# Altium schematic symbol library MAJ library.SchLib: 44 symbols
Pins are listed as number, name and electrical type; pins without a type are passive.

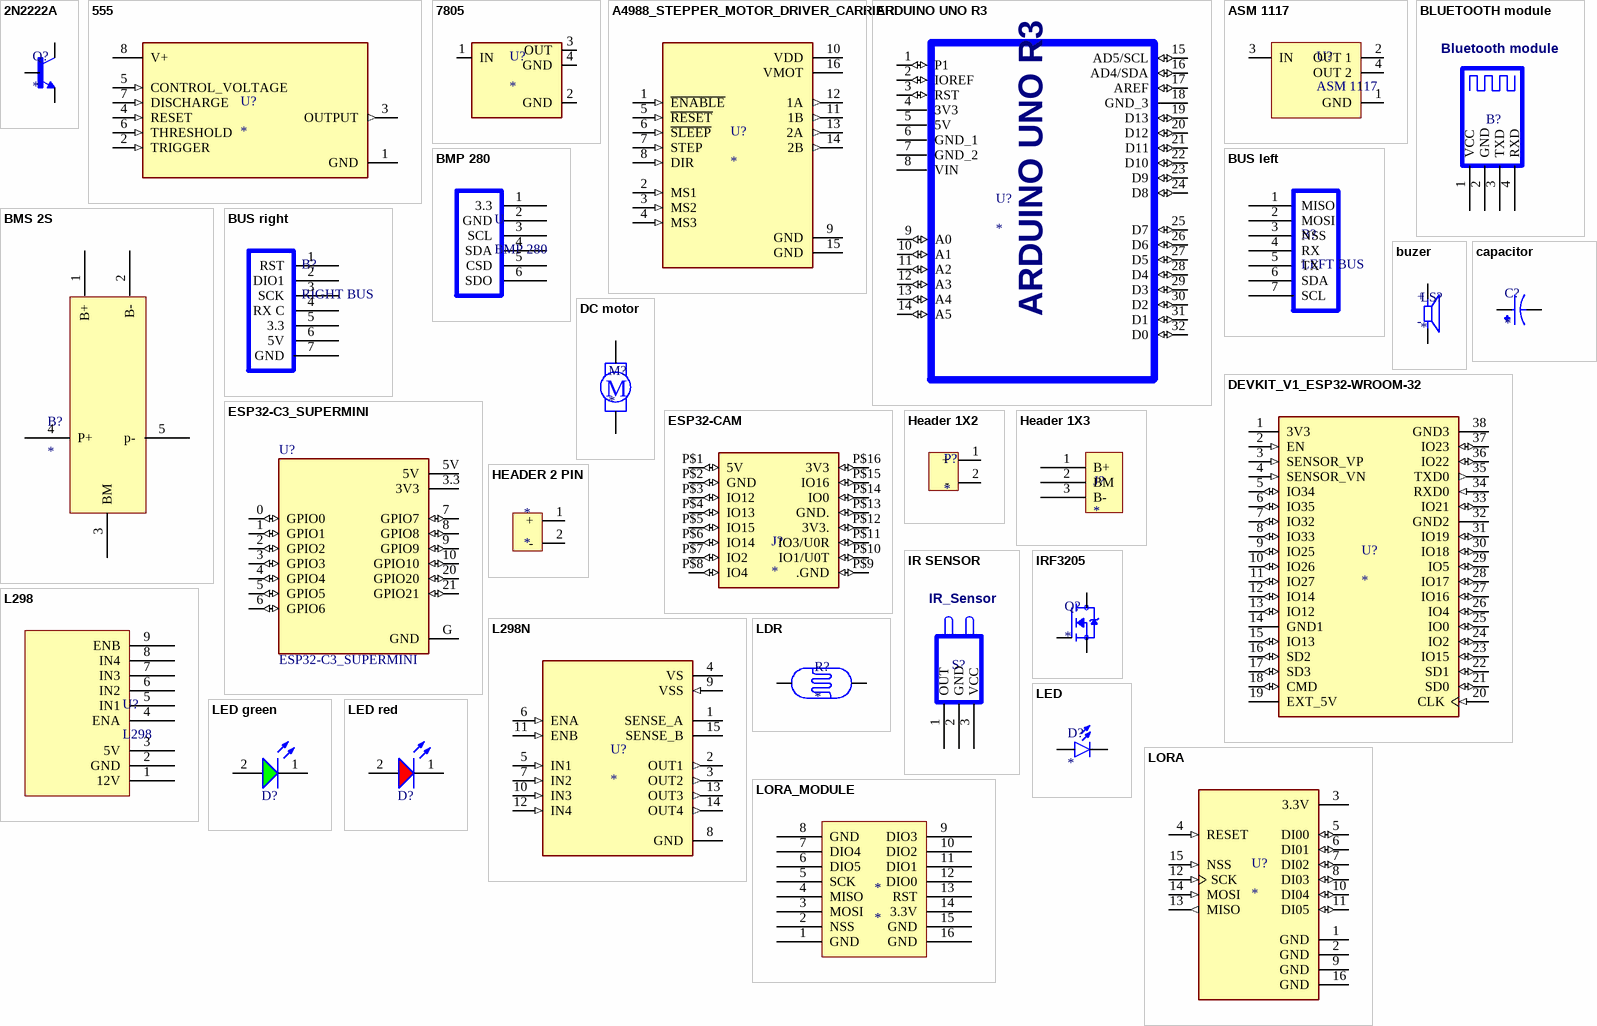
[diagram p0: symbols 2N2222A to LORA_MODULE]

## 2N2222A
designator Q?
Bipolar (BJT) Transistor NPN 40 V 600 mA 250MHz 625 mW Through Hole TO-92; MF: Diotec Semiconductor; MP: 2N2222A; Package: TO-92-3 Diotec; Check_prices: https://www.snapeda.com/parts/2N2222A/Diotec/view-part/?ref=eda; Value: *; Purchase-URL: https://pricing.snapeda.com/search/part/2N2222A/?ref=eda; Availability: In Stock; SnapEDA_Link: https://www.snapeda.com/parts/2N2222A/Diotec/view-part/?ref=snap; Price: None
footprint 2n2222
pins: 1 E, 2 B, 3 C

## 555
designator U?
Highly Stable 555 Timer; MP: LM555CM/NOPB; MF: Texas Instruments; Price: None; Availability: In Stock; Package: SOIC-8 Texas Instruments; Value: *; SnapEDA_Link: https://www.snapeda.com/parts/LM555CM/NOPB/Texas+Instruments/view-part/?ref=snap; Purchase-URL: https://pricing.snapeda.com/search/part/LM555CM/NOPB/?ref=eda; Check_prices: https://www.snapeda.com/parts/LM555CM/NOPB/Texas+Instruments/view-part/?ref=eda
footprint 555
pins: 1 GND (power), 2 TRIGGER (in), 3 OUTPUT (out), 4 RESET (in), 5 CONTROL_VOLTAGE (in), 6 THRESHOLD (in), 7 DISCHARGE (in), 8 V+ (power)

## 7805
designator U?
Linear Voltage Regulator IC 1 Output 1A SOT-223; MP: AZ1117EH-5.0TRG1; MF: Diodes Inc.; Package: SOT-223 Diodes Inc.; Digi-Key_Part_Number: AZ1117EH-5.0TRG1DICT-ND; SnapEDA_Link: https://www.snapeda.com/parts/AZ1117EH-5.0TRG1/Diodes%20Inc./view-part/795858/?ref=snap; Purchase-URL: https://pricing.snapeda.com/search/part/AZ1117EH-5.0TRG1/?ref=eda; Check_prices: https://www.snapeda.com/parts/AZ1117EH-5.0TRG1/Diodes%20Inc./view-part/795858/?ref=eda; Value: *
footprint 7805
pins: 1 IN (power), 2 GND (power), 3 OUT (power), 4 GND (power)

## A4988_STEPPER_MOTOR_DRIVER_CARRIER
designator U?
Stepper motor controler; IC: A4988; 1A; Uin mot: 8Ã·35V; MP: A4988_STEPPER_MOTOR_DRIVER_CARRIER; Price: None; Value: *; Package: None; Availability: Unavailable
footprint MODULE_A4988_STEPPER_MOTOR_DRIVER_CARRIER
pins: 1 ~{ENABLE} (in), 2 MS1 (in), 3 MS2 (in), 4 MS3 (in), 5 ~{RESET} (in), 6 ~{SLEEP} (in), 7 STEP (in), 8 DIR (in), 9 GND (power), 10 VDD (power), 11 1B (out), 12 1A (out), 13 2A (out), 14 2B (out), 15 GND (power), 16 VMOT (power)

## ARDUINO UNO R3
designator U?
footprint ARDUINO UNO
pins: 1 P1 (io), 2 IOREF (io), 3 RST (io), 4 3V3 (power), 5 5V (power), 6 GND_1 (power), 7 GND_2 (power), 8 VIN (power), 9 A0 (io), 10 A1 (io), 11 A2 (io), 12 A3 (io), 13 A4 (io), 14 A5 (io), 15 AD5/SCL (io), 16 AD4/SDA (io), 17 AREF (io), 18 GND_3 (power), 19 D13 (io), 20 D12 (io), 21 D11 (io), 22 D10 (io), 23 D9 (io), 24 D8 (io), 25 D7 (io), 26 D6 (io), 27 D5 (io), 28 D4 (io), 29 D3 (io), 30 D2 (io), 31 D1 (io), 32 D0 (io)

## ASM 1117
designator U?
footprint 7805
pins: 1  GND, 2  OUT 1, 3 IN, 4 OUT 2

## BLUETOOTH module
designator B?  (value not drawn)
footprint BLUETOOTH module
pins: 1 VCC, 2 GND, 3 TXD, 4 RXD
text: Bluetooth module

## BMP 280
designator U
footprint BMP 280
pins: 1 3.3, 2 GND, 3 SCL, 4 SDA, 5 CSD, 6 SDO

## BMS 2S
designator B?
footprint BMS 2S
pins: 1 B+, 2 B-, 3 BM, 4 P+, 5 p-

## BUS left
designator B?, comment LEFT BUS
footprint bus left
pins: 1 MISO, 2 MOSI, 3 NSS, 4 RX, 5 TX, 6 SDA, 7 SCL

## BUS right
designator B?, comment RIGHT BUS
footprint bus right
pins: 1 RST, 2 DIO1, 3 SCK, 4 RX C, 5 3.3, 6 5V, 7 GND

## buzer
designator LS?
12 mm, 3.5 V, 85 dB, Through Hole, Magnetic Audio Transducer Buzzer; MF: CUI Devices; MP: CEM-1203(42); Package: None; Price: None; Check_prices: https://www.snapeda.com/parts/CEM-1203(42)/CUI+Devices/view-part/?ref=eda; Value: *; CUI_purchase_URL: https://www.cuidevices.com/product/audio/buzzers/audio-transducers/cem-1203(42)?utm_source=snapeda.com&utm_medium=referral&utm_campaign=snapedaBOM; SnapEDA_Link: https://www.snapeda.com/parts/CEM-1203(42)/CUI+Devices/view-part/?ref=snap; Availability: In Stock; Purchase-URL: https://pricing.snapeda.com/search/part/CEM-1203(42)/?ref=eda
footprint buzzer
pins: N, P
text: +; -

## capacitor
designator C?
Aluminum Electrolytic Capacitors - Radial Leaded; MF: Panasonic; MP: EEU-FC1V221E; SnapEDA_Link: https://www.snapeda.com/parts/EEU-FC1V221E/Panasonic/view-part/?ref=snap; Package: RADIAL-2 Panasonic; Value: *; Check_prices: https://www.snapeda.com/parts/EEU-FC1V221E/Panasonic/view-part/?ref=eda
footprint capacitor
pins: N, P

## DC motor
designator M?
footprint HEADER 1X2
pins: 1  , 2  
text: M

## DEVKIT_V1_ESP32-WROOM-32
designator U?
WROOM-32 Development Board ESP32 ESP-32S WiFi Bluetooth Dev Module; MF: Espressif Systems; MP: DEVKIT V1 ESP32-WROOM-32; SnapEDA_Link: https://www.snapeda.com/parts/DEVKIT%20V1%20ESP32-WROOM-32/Espressif+Systems/view-part/?ref=snap; Package: Package; Value: *; Check_prices: https://www.snapeda.com/parts/DEVKIT%20V1%20ESP32-WROOM-32/Espressif+Systems/view-part/?ref=eda
footprint MODULE_DEVKIT_V1_ESP32-WROOM-32
pins: 1 3V3 (power), 2 EN (in), 3 SENSOR_VP (in), 4 SENSOR_VN (in), 5 IO34 (io), 6 IO35 (io), 7 IO32 (io), 8 IO33 (io), 9 IO25 (io), 10 IO26 (io), 11 IO27 (io), 12 IO14 (io), 13 IO12 (io), 14 GND1 (power), 15 IO13 (io), 16 SD2 (io), 17 SD3 (io), 18 CMD (io), 19 EXT_5V (power), 20 CLK (in), 21 SD0 (io), 22 SD1 (io), 23 IO15 (io), 24 IO2 (io), 25 IO0 (io), 26 IO4 (io), 27 IO16 (io), 28 IO17 (io), 29 IO5 (io), 30 IO18 (io), 31 IO19 (io), 32 GND2 (power), 33 IO21 (io), 34 RXD0 (in), 35 TXD0 (out), 36 IO22 (io), 37 IO23 (io), 38 GND3 (power)

## ESP32-C3_SUPERMINI
designator U?
Super tiny ESP32-C3 board; MF: Espressif Systems; MP: ESP32-C3 SuperMini; SnapEDA_Link: https://www.snapeda.com/parts/ESP32-C3%20SuperMini/Espressif+Systems/view-part/?ref=snap; Package: Package; Value: *; Check_prices: https://www.snapeda.com/parts/ESP32-C3%20SuperMini/Espressif+Systems/view-part/?ref=eda
footprint MODULE_ESP32-C3_SUPERMINI
pins: 0 GPIO0 (io), 1 GPIO1 (io), 2 GPIO2 (io), 3 GPIO3 (io), 3.3 3V3 (power), 4 GPIO4 (io), 5 GPIO5 (io), 5V (power), 6 GPIO6 (io), 7 GPIO7 (io), 8 GPIO8 (io), 9 GPIO9 (io), 10 GPIO10 (io), 20 GPIO20 (io), 21 GPIO21 (io), G GND (power)

## ESP32-CAM
designator J?
ESP32 ESP32 Transceiver; 802.11 a/b/g/n (Wi-Fi, WiFi, WLAN), BluetoothÂ® Smart 4.x Low Energy (BLE) Evaluation Board; MF: AI-Thinker; MP: ESP32-CAM; SnapEDA_Link: https://www.snapeda.com/parts/ESP32-CAM/AI-Thinker/view-part/?ref=snap; Package: None; Value: *; Check_prices: https://www.snapeda.com/parts/ESP32-CAM/AI-Thinker/view-part/?ref=eda
footprint ESP32-CAM
pins: P$1 5V (io), P$2 GND (io), P$3 IO12 (io), P$4 IO13 (io), P$5 IO15 (io), P$6 IO14 (io), P$7 IO2 (io), P$8 IO4 (io), P$9 .GND (io), P$10 IO1/U0T (io), P$11 IO3/U0R (io), P$12 3V3. (io), P$13 GND. (io), P$14 IO0 (io), P$15 IO16 (io), P$16 3V3 (io)

## Header 1X2
designator P?
footprint Header 2 pin
pins: 1 +, 2 -

## Header 1X3
designator J?
footprint Header 1X3
pins: 1 B+, 2 BM, 3 B-

## HEADER 2 PIN
designator *
footprint HEADER 1X2
pins: 1 +, 2 -

## IR SENSOR
designator S?  (value not drawn)
footprint IR SENSOR
pins: 1 OUT, 2 GND, 3 VCC
text: IR_Sensor

## IRF3205
designator Q?
N-Channel 55V 110A (Tc) 200W (Tc) Through Hole TO-220AB; MF: Infineon Technologies; MP: IRF3205; SnapEDA_Link: https://www.snapeda.com/parts/IRF3205/Infineon+Technologies/view-part/?ref=snap; Package: TO-220 Infineon; Value: *; Check_prices: https://www.snapeda.com/parts/IRF3205/Infineon+Technologies/view-part/?ref=eda
footprint IRF3205
pins: 1 G, 2 D, 3 S

## L298
designator U?
footprint L298 motor driver
pins: 1 12V, 2 GND, 3 5V, 4 ENA, 5 IN1, 6 IN2, 7 IN3, 8 IN4, 9 ENB

## L298N
designator U?
Dual Full Bridge Motor Driver 15-Pin(15+Tab) MULTIWATT V Tube; MP: L298N; Availability: Unavailable; Package: None; Value: *; Price: None
footprint TO127P2020X500X2100-15
pins: 1 SENSE_A, 2 OUT1 (out), 3 OUT2 (out), 4 VS (power), 5 IN1 (in), 6 ENA (in), 7 IN2 (in), 8 GND (power), 9 VSS (in), 10 IN3 (in), 11 ENB (in), 12 IN4 (in), 13 OUT3 (out), 14 OUT4 (out), 15 SENSE_B

## LDR
designator R?
Photocell Analog Output 2-Pin; MF: Adafruit; MP: 161; Package: NON STANDARD-2 Adafruit; Price: None; Value: *; SnapEDA_Link: https://www.snapeda.com/parts/161/Adafruit+Industries+LLC/view-part/?ref=snap; Availability: In Stock; Check_prices: https://www.snapeda.com/parts/161/Adafruit+Industries+LLC/view-part/?ref=eda
footprint LDR
pins: 1, 2

## LED
designator D?
Red 617nm LED Indication - Discrete 2V Radial; MP: WP7113ID; MF: Kingbright; Price: None; Package: Radial Kingbright; Check_prices: https://www.snapeda.com/parts/WP7113ID/Kingbright/view-part/?ref=eda; Purchase-URL: https://pricing.snapeda.com/search/part/WP7113ID/?ref=eda; Availability: In Stock; Value: *; SnapEDA_Link: https://www.snapeda.com/parts/WP7113ID/Kingbright/view-part/?ref=snap
footprint LED THROUGH HOLE
pins: 1 A, 2 C

## LED green
designator D?, comment Bright Green, 2V, 140°  (value not drawn)
WL-SMCD Mono-color Chip LED Diffused, SMT, size 0603, Bright Green, 2V, 140°; Manufacturer Part Number: 150060VS55040; Manufacturer: Wurth Elektronik; Case/Size Code: 0603; Chip Technology: AlInGaP; Dominant Wavelength: 573nm; Luminous Intensity: 60mcd; Peak Wavelength: 575nm; Category: Signal LEDs; Match Code: WL-SMCD; ComponentLink1Description: Website Link; ComponentLink1URL: https://www.we-online.com/redexpert/article/150060VS55040?ad; ComponentLink2Description: Datasheet Link; ComponentLink2URL: https://www.we-online.com/redexpert/spec/150060VS55040?ad; Mount: Surface Mount; Operating Temperature Max: 85°C; Operating Temperature Min: -40°C; Packaging: Tape and Reel; Length: 1.6mm; Width: 0.8mm; Height: 0.4mm; Emitting Color: Bright Green; Forward Voltage: 2V; Viewing Angle: 140°
footprint LED green (SMD Mono-color Chip LED, body 1.6x0.8mm)
pins: 1 K, 2 A

## LED red
designator D?, comment Super Red, 2V, 140°  (value not drawn)
WL-SMCD Mono-color Chip LED Diffused, SMT, size 0603, Super Red, 2V, 140°; Manufacturer Part Number: 150060SS55040; Manufacturer: Wurth Elektronik; Case/Size Code: 0603; Chip Technology: AlInGaP; Dominant Wavelength: 630nm; Luminous Intensity: 70mcd; Peak Wavelength: 645nm; Category: Signal LEDs; Match Code: WL-SMCD; ComponentLink1Description: Website Link; ComponentLink1URL: https://www.we-online.com/redexpert/article/150060SS55040?ad; ComponentLink2Description: Datasheet Link; ComponentLink2URL: https://www.we-online.com/redexpert/spec/150060SS55040?ad; Mount: Surface Mount; Operating Temperature Max: 85°C; Operating Temperature Min: -40°C; Packaging: Tape and Reel; Length: 1.6mm; Width: 0.8mm; Height: 0.4mm; Emitting Color: Super Red; Forward Voltage: 2V; Viewing Angle: 140°
footprint LED red (SMD Mono-color Chip LED, body 1.6x0.8mm)
pins: 1 K, 2 A

## LORA
designator U?
Ra-02 LoRa RF M5Stack Platform Evaluation Expansion Board; MP: RA-02_LORA; Price: None; Availability: Unavailable; Value: *; Package: None
footprint LORA
pins: 1 GND (power), 2 GND (power), 3 3.3V (power), 4 RESET (in), 5 DI00 (io), 6 DI01 (io), 7 DI02 (io), 8 DI03 (io), 9 GND (power), 10 DI04 (io), 11 DI05 (io), 12 SCK (in), 13 MISO (out), 14 MOSI (in), 15 NSS (in), 16 GND (power)

## LORA_MODULE
designator *
footprint LORA_MODULE
pins: 1 GND, 2 NSS, 3 MOSI, 4 MISO, 5 SCK, 6 DIO5, 7 DIO4, 8 GND, 9 DIO3, 10 DIO2, 11 DIO1, 12 DIO0, 13 RST, 14 3.3V, 15 GND, 16 GND

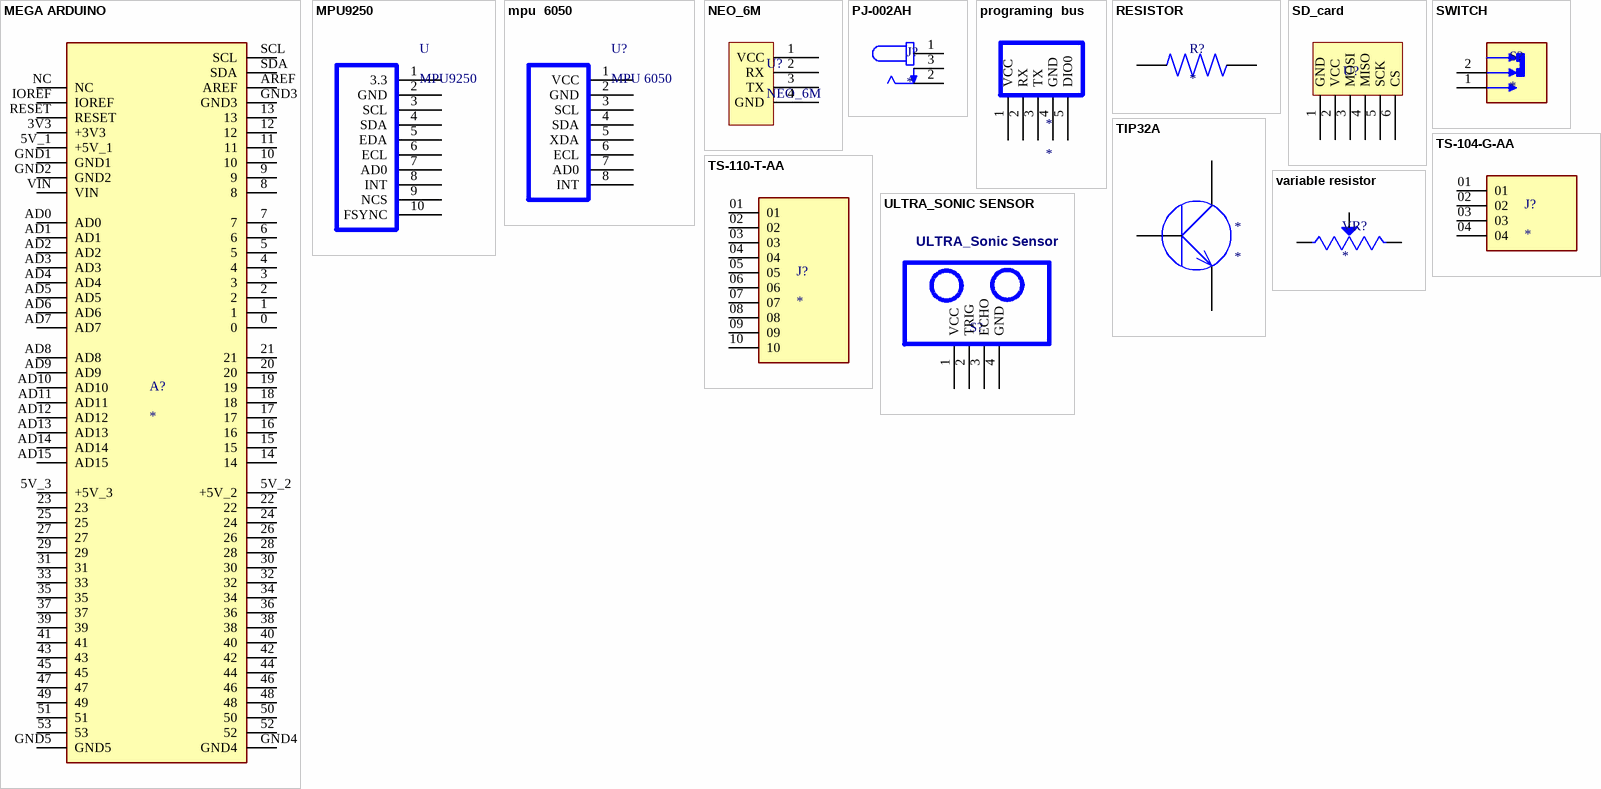
[diagram p1: symbols MEGA ARDUINO to variable resistor]

## MEGA ARDUINO
designator A?
8-bit board with 54 digital pins, 16 analog inputs, and 4 serial ports.; MF: Arduino; MP: Arduino Mega 2560 Rev3; SnapEDA_Link: https://www.snapeda.com/parts/Arduino%20Mega%202560%20Rev3/Arduino/view-part/?ref=snap; Package: Non-Standard Arduino; Value: *; Check_prices: https://www.snapeda.com/parts/Arduino%20Mega%202560%20Rev3/Arduino/view-part/?ref=eda
footprint MEGA ARDUINO
pins: 0, 1, 2, 3, 3V3 +3V3, 4, 5, 5V_1 +5V_1, 5V_2 +5V_2, 5V_3 +5V_3, 6, 7, 8, 9, 10, 11, 12, 13, 14, 15, 16, 17, 18, 19, 20, 21, 22, 23, 24, 25, 26, 27, 28, 29, 30, 31, 32, 33, 34, 35, 36, 37, 38, 39, 40, 41, 42, 43, 44, 45, 46, 47, 48, 49, 50, 51, 52, 53, AD0, AD1, AD2, AD3, AD4, AD5, AD6, AD7, AD8, AD9, AD10, AD11, AD12, AD13, AD14, AD15, AREF, GND1, GND2, GND3, GND4, GND5, IOREF, NC, RESET, SCL, SDA, VIN

## MPU9250
designator U
footprint MPU 9250
pins: 1 3.3, 2 GND, 3 SCL, 4 SDA, 5 EDA, 6 ECL, 7 AD0, 8 INT, 9 NCS, 10 FSYNC

## mpu  6050
designator U?, comment MPU 6050
footprint MPU 6050
pins: 1 VCC, 2 GND, 3 SCL, 4 SDA, 5 XDA, 6 ECL, 7 AD0, 8 INT

## NEO_6M
designator U?
footprint NEO_6M
pins: 1 VCC, 2 RX, 3 TX, 4 GND

## PJ-002AH
designator J?
2.0 x 6.5 mm, 5.0 A, Horizontal, Through Hole, Dc Power Jack Connector; MF: CUI Devices; MP: PJ-002AH; Purchase-URL: https://pricing.snapeda.com/search/part/PJ-002AH/?ref=eda; Check_prices: https://www.snapeda.com/parts/PJ-002AH/CUI+Devices/view-part/?ref=eda; Value: *; Package: None; Price: None; Availability: In Stock; CUI_purchase_URL: https://www.cuidevices.com/product/interconnect/connectors/dc-power-connectors/jacks/pj-002ah?utm_source=snapeda.com&utm_medium=referral&utm_campaign=snapedaBOM; SnapEDA_Link: https://www.snapeda.com/parts/PJ-002AH/CUI+Devices/view-part/?ref=snap
footprint CUI_PJ-002AH
pins: 1, 2, 3

## programing  bus
designator *
pins: 1 VCC, 2 RX, 3 TX, 4 GND, 5 DIO0

## RESISTOR
designator R?
RES SMD 270 OHM 5% 0.4W 0805; MP: ESR10EZPJ271; Package: None; Price: None; Value: *; Availability: Unavailable
footprint RESISTOR
pins: 1, 2

## SD_card 
designator U?  (value not drawn)
footprint SD_CARD
pins: 1 GND, 2 VCC, 3 MOSI, 4 MISO, 5 SCK, 6 CS

## SWITCH
designator S?
Slide Switch SPST Through Hole; MF: C&K; MP: S101031MS02Q; SnapEDA_Link: https://www.snapeda.com/parts/S101031MS02Q/C%2526K/view-part/?ref=snap; Purchase-URL: https://pricing.snapeda.com/search/part/S101031MS02Q/?ref=eda; Package: None; Price: None; Availability: In Stock; Value: *; Check_prices: https://www.snapeda.com/parts/S101031MS02Q/C%2526K/view-part/?ref=eda
footprint SWITCH
pins: 1, 2

## TIP32A
designator *
footprint TIP32A
pins: 1 E, 2 C, 3 B

## TS-104-G-AA
designator J?
MF: Samtec Inc.; MP: TS-104-G-AA; Price: None; Package: None; Availability: Unavailable; Value: *
footprint SAMTEC_TS-104-G-AA
pins: 01, 02, 03, 04

## TS-110-T-AA
designator J?
10 Position Header Connector Male Pin Tin; MF: Samtec; MP: TS-110-T-AA; SnapEDA_Link: https://www.snapeda.com/parts/TS-110-T-AA/Samtec/view-part/?ref=snap; Package: None; Value: *; Check_prices: https://www.snapeda.com/parts/TS-110-T-AA/Samtec/view-part/?ref=eda
footprint SAMTEC_TS-110-T-AA
pins: 01, 02, 03, 04, 05, 06, 07, 08, 09, 10

## ULTRA_SONIC SENSOR
designator S?  (value not drawn)
footprint ULTRA_SONIC sensor
pins: 1 VCC, 2 TRIG, 3 ECHO, 4 GND
text: ULTRA_Sonic Sensor

## variable resistor
designator VR?
Trimmer Resistors - Through Hole; MP: 3296W-FM1-502; MF: Bourns; Availability: Warning; SnapEDA_Link: https://www.snapeda.com/parts/3296W-FM1-502/Bourns/view-part/3211169/?ref=snap; Package: None; Price: None; Value: *; Check_prices: https://www.snapeda.com/parts/3296W-FM1-502/Bourns/view-part/3211169/?ref=eda
footprint TRIM_3296W-FM1-502
pins: 1 CCW, 2 WIPER, 3 CW